# Altium footprint library PCB_BQ51013BYFPR.PcbLib: 17 footprints (part 1 of 2)
Each footprint in its own frame and in the unit in brackets; x right, y up, seen from the top. Pads: shape width x height; smd on the part's side, far side on the other; paste and mask are expansions set on the pad; w line width, h text height; cw(c..) or ccw(c..) is an arc to the next point about the centre after c.
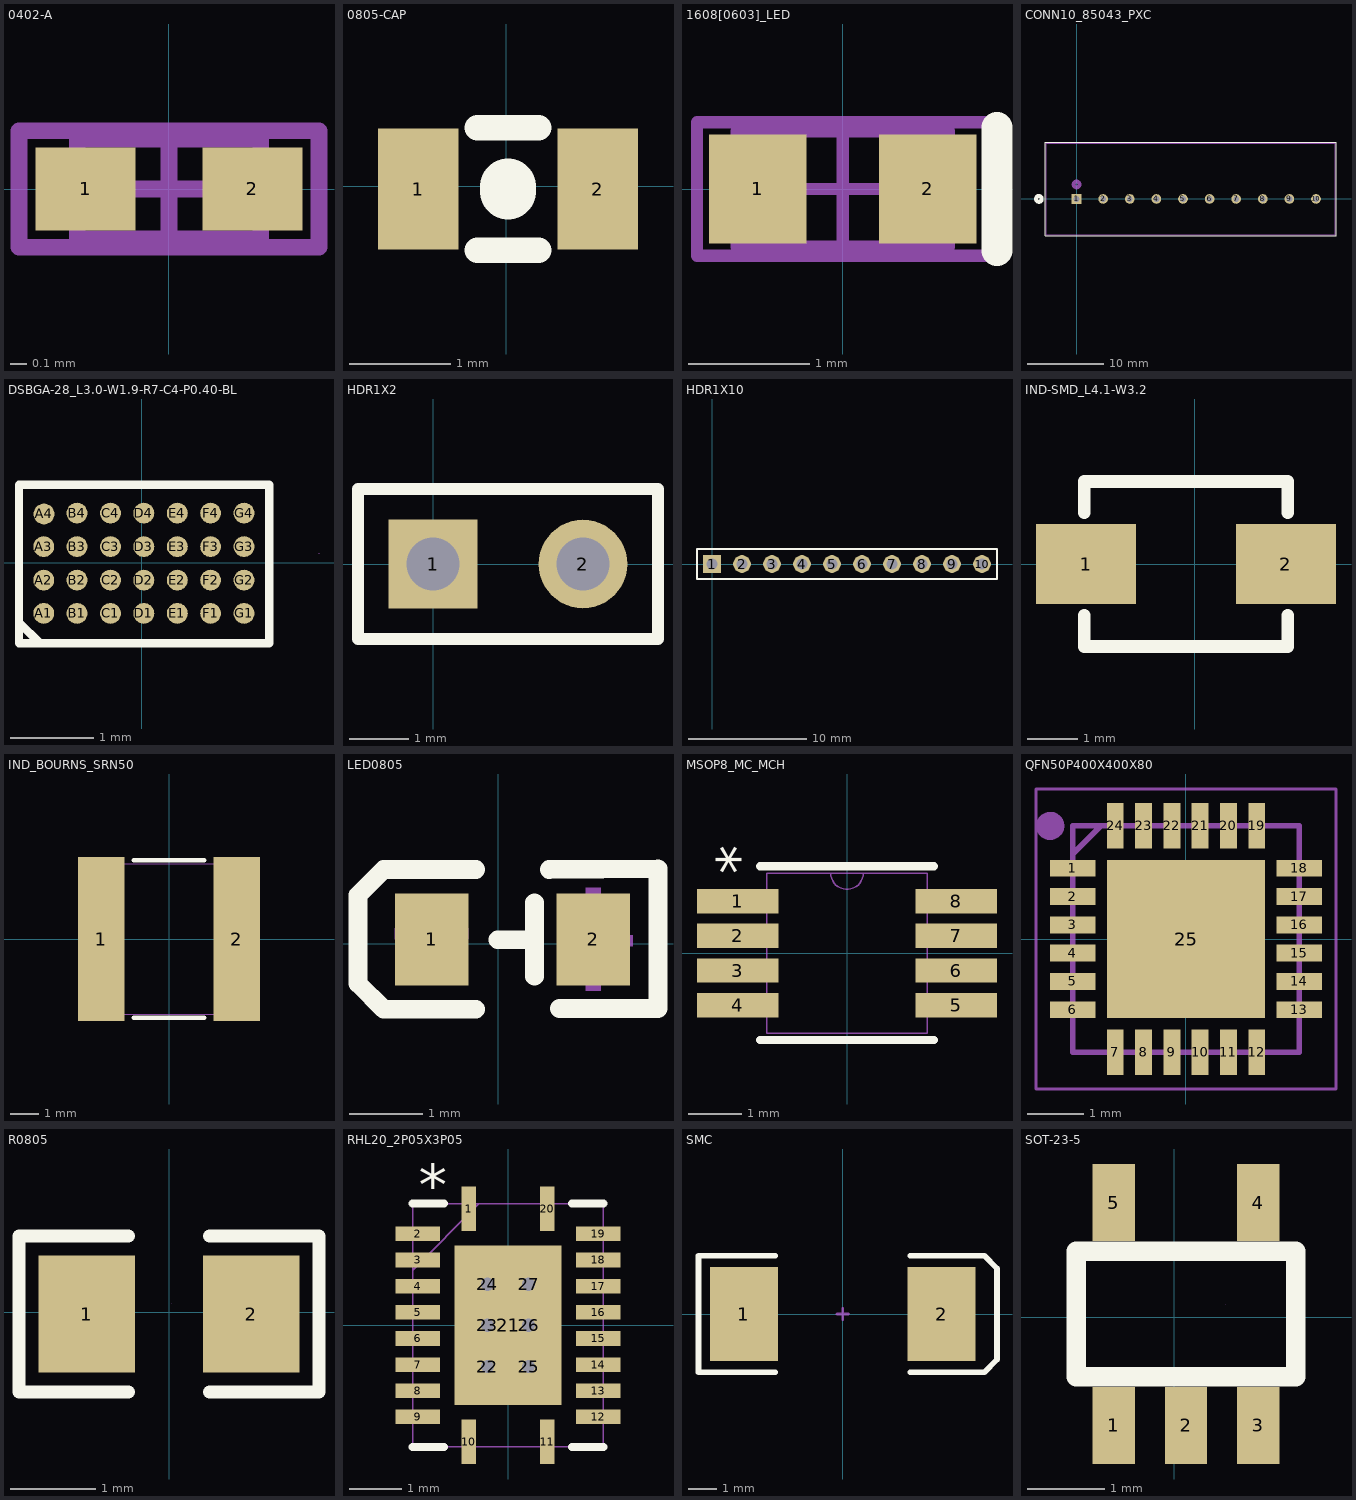
[diagram p0: the footprints below, top view; thin cyan lines are the x and y axes]

## 0402-A [mm] "Chip Inductor, Body 1.0x0.5mm, IPC High Density"
height 0.55
pads (2):
  rect 0.6x0.5 smd: 1(-0.5,0) 2(0.5,0)
Mechanical 13:
  lines w0.1: -0.55,-0.3 -0.55,0.3 0.55,0.3 0.55,-0.3 -0.55,-0.3
Mechanical 15:
  lines w0.1: -0.3,0 0.3,0 ; 0,-0.3 0,0.3 ; -0.9,-0.35 -0.9,0.35 0.9,0.35 0.9,-0.35 -0.9,-0.35
3D body: height 0.55, standoff 0, extent -0.55,-0.3 0.55,0.3

## 0805-CAP [mil]
height 104.33
pads (2):
  rect 31.5x47.2 smd: 1(-34.25,-1) 2(35.75,-1)
Top Overlay:
  lines w10: -11.25,-25 12.75,-25 ; -11.25,23 12.75,23
  lines w22: 0.75,-2 0.75,0
Mechanical 15:
  lines w0.1: 20.74,3.99 20.76,4.01

## 1608[0603]_LED [mm] "Chip Capacitor, Body 1.6x0.8mm, IPC High Density"
height 1.3
pads (2):
  rect 0.8x0.9 smd: 1(-0.7,0) 2(0.7,0)
Top Overlay:
  lines w0.254: 1.27,-0.508 1.27,0.508
Mechanical 13:
  lines w0.1: -0.875,-0.475 -0.875,0.475 0.875,0.475 0.875,-0.475 -0.875,-0.475
Mechanical 15:
  lines w0.1: -0.475,0 0.475,0 ; 0,-0.475 0,0.475 ; -1.2,-0.55 -1.2,0.55 1.2,0.55 1.2,-0.55 -1.2,-0.55
3D body: height 1.3, standoff 0, extent -0.875,-0.475 0.875,0.475

## CONN10_85043_PXC [mil]
pads (10):
  rect 50x50 hole 30 mask-1000: 1(0,0)
  round 50 hole 30 mask-1000: 2(137.8,0) 3(275.59,0) 4(413.39,0) 5(551.18,0) 6(688.98,0) 7(826.77,0) 8(964.57,0) 9(1102.36,0) 10(1240.16,0)
Top Overlay:
  circle w20: c-195,0 r15
  lines w6: -162.42,-189.6 1343.58,-189.6 1343.58,292.4 -162.42,292.4 -162.42,-189.6
Bottom Overlay:
  circle w20: c-195,0 r15
Top Solder:
  drawing of 10 lines, arcs and shapes, not listed
Bottom Solder:
  drawing of 10 lines, arcs and shapes, not listed
Mechanical 1:
  circle w20: c0,75 r15
  lines w1: -157.42,-184.6 1338.58,-184.6 1338.58,287.4 -157.42,287.4 -157.42,-184.6

## DSBGA-28_L3.0-W1.9-R7-C4-P0.40-BL [mm]
height 2.65
pads (28):
  round 0.25 smd: A1(-1.176,-0.607) A2(-1.176,-0.208) A3(-1.176,0.193) A4(-1.173,0.584) B1(-0.777,-0.607) B2(-0.777,-0.208) B3(-0.777,0.193) B4(-0.777,0.594) C1(-0.376,-0.607) C2(-0.376,-0.208) C3(-0.376,0.193) C4(-0.376,0.594) D1(0.023,-0.607) D2(0.023,-0.208) D3(0.023,0.193) D4(0.023,0.594) E1(0.424,-0.607) E2(0.424,-0.208) E3(0.424,0.193) E4(0.424,0.594) F1(0.823,-0.607) F2(0.823,-0.208) F3(0.823,0.193) F4(0.823,0.594) G1(1.224,-0.607) G2(1.224,-0.208) G3(1.224,0.193) G4(1.224,0.594)
Top Overlay:
  lines w0.1: -1.473,-0.965 -1.473,0.935 1.527,0.935 1.527,-0.965 -1.473,-0.965
  lines w0.102: -1.473,-0.715 -1.223,-0.965
Mechanical 15:
  lines w0.003: 2.122,0.111 2.122,0.112

## HDR1X2 [mm] "Connector; Header; 2 Position"
height 2.65
pads (2):
  rect 1.5x1.5 hole 0.9: 1(0,0)
  round 1.5 hole 0.9: 2(2.54,0)
Top Overlay:
  lines w0.2: -1.27,-1.27 -1.27,1.27 3.81,1.27 3.81,-1.27 -1.27,-1.27

## HDR1X10 [mm] "Connector; Header; 10 Position"
height 2.65
pads (10):
  rect 1.5x1.5 hole 0.9: 1(0,0)
  round 1.5 hole 0.9: 2(2.54,0) 3(5.08,0) 4(7.62,0) 5(10.16,0) 6(12.7,0) 7(15.24,0) 8(17.78,0) 9(20.32,0) 10(22.86,0)
Top Overlay:
  lines w0.2: -1.27,-1.27 24.13,-1.27 24.13,1.27 0.635,1.27 -1.27,1.27 -1.27,-1.27

## IND-SMD_L4.1-W3.2 [mm]
height 2.65
pads (2):
  rect 2x1.6 smd: 1(-2.175,0) 2(1.825,0)
Top Overlay:
  lines w0.254: -2.207,-1.031 -2.207,-1.651 1.857,-1.651 1.857,-1.031 ; -2.207,1.031 -2.207,1.651 1.857,1.651 1.857,1.031
Mechanical 15:
  lines w0.003: 0.904,0.127 0.905,0.127

## IND_BOURNS_SRN50 [mil]
pads (2):
  rect 63x224 smd: 1(-92.5,0) 2(92.5,0)
Top Overlay:
  lines w6: -47.9,-107.5 47.9,-107.5 ; -47.9,107.5 47.9,107.5
Mechanical 1:
  lines w1: -102.5,-102.5 102.5,-102.5 102.5,102.5 -102.5,102.5 -102.5,-102.5

## LED0805 [mm]
height 2.65
pads (2):
  rect 1x1.25 smd: 1(-0.905,0.061) 2(1.295,0.061)
Top Overlay:
  lines w0.254: -0.305,-0.889 -1.555,-0.889 ; -0.305,1.011 -1.555,1.011 ; -0.005,0.056 0.495,0.056 ; 0.495,-0.439 0.495,0.561 ; 0.695,1.011 2.175,1.021 2.175,-0.879 0.835,-0.879 ; -1.555,-0.889 -1.905,-0.539 -1.905,0.661 -1.555,1.011 ; -1.555,-0.889 -1.555,-0.889 ; -1.555,1.011 -1.555,1.011
Mechanical 15:
  region: -1.405,0.061 -0.405,0.061 -0.405,0.211 -1.405,0.211
  region: 0.83,-0.033 1.83,-0.033 1.83,0.117 0.83,0.117
  region: 1.195,0.761 1.395,0.761 1.395,-0.639 1.195,-0.639

## MSOP8_MC_MCH [mil]
pads (8):
  rect 60x18 smd: 1(-80.5,38.39) 2(-80.5,12.8) 3(-80.5,-12.8) 4(-80.5,-38.39) 5(80.5,-38.39) 6(80.5,-12.8) 7(80.5,12.8) 8(80.5,38.39)
Top Overlay:
  lines w6: -64,-64 64,-64 ; -64,64 64,64
  text "*" at -64.61,58 h31.25
Mechanical 1:
  lines w1: -12,59 ccw(c0,59) 12,59 ; -96.5,-46.39 -96.5,-30.39 -59,-30.39 -59,-46.39 -96.5,-46.39 ; -96.5,-20.8 -96.5,-4.8 -59,-4.8 -59,-20.8 -96.5,-20.8 ; -96.5,4.8 -96.5,20.8 -59,20.8 -59,4.8 -96.5,4.8 ; -96.5,30.39 -96.5,46.39 -59,46.39 -59,30.39 -96.5,30.39 ; -59,-59 59,-59 59,59 -59,59 -59,-59 ; 59,-46.39 59,-30.39 96.5,-30.39 96.5,-46.39 59,-46.39 ; 59,-20.8 59,-4.8 96.5,-4.8 96.5,-20.8 59,-20.8 ; 59,4.8 59,20.8 96.5,20.8 96.5,4.8 59,4.8 ; 59,30.39 59,46.39 96.5,46.39 96.5,30.39 59,30.39
  text "*" at -64.61,58 h31.25

## QFN50P400X400X80 [mil]
height 104.33
pads (25):
  rect 31.5x11.81 smd: 1(-78.42,49.52) 2(-78.42,29.84) 3(-78.42,10.15) 4(-78.42,-9.53) 5(-78.42,-29.21) 6(-78.42,-48.9) 13(79.06,-48.9) 14(79.06,-29.21) 15(79.06,-9.53) 16(79.06,10.15) 17(79.06,29.84) 18(79.06,49.52)
  rect 11.81x31.5 smd: 7(-48.9,-78.42) 8(-29.21,-78.42) 9(-9.53,-78.42) 10(10.15,-78.42) 11(29.84,-78.42) 12(49.52,-78.42) 19(49.52,79.06) 20(29.84,79.06) 21(10.15,79.06) 22(-9.53,79.06) 23(-29.21,79.06) 24(-48.9,79.06)
  rect 110.24x110.24 smd: 25(0.32,0.32)
Mechanical 15:
  lines w1.97: -104.02,-104.02 -104.02,104.64 104.64,104.64 104.64,-104.02 -104.02,-104.02
  lines w3.94: -78.42,59.38 -58.74,79.06 ; -78.42,-78.42 -78.42,79.06 79.06,79.06 79.06,-78.42 -78.42,-78.42
  lines w9.84: -89.26,78.84 cw(c-94.17,78.94) -89.26,79.05

## R0805 [mm]
height 2.65
pads (2):
  rect 1.133x1.377 smd: 1(-0.966,-0.023) 2(0.966,-0.023)
Top Overlay:
  lines w0.152: -0.476,-0.94 -1.761,-0.94 -1.761,0.894 -0.476,0.894 ; 0.476,-0.94 1.761,-0.94 1.761,0.894 0.476,0.894
Top Paste:
  region: -1.7,-0.663 -1.7,0.617 -1.65,0.667 -0.5,0.667 -0.45,0.617 -0.445,0.207 -0.895,0.207 -0.895,-0.243 -0.455,-0.243 -0.45,-0.663 -0.5,-0.713 -1.65,-0.713
  region: 0.45,-0.663 0.45,-0.243 0.895,-0.243 0.895,0.207 0.455,0.207 0.45,0.617 0.5,0.667 1.65,0.667 1.7,0.617 1.7,-0.663 1.65,-0.713 0.5,-0.713
Mechanical 15:
  lines w0.003: 0.029,0.104 0.03,0.105

## RHL20_2P05X3P05 [mm]
height 1.4
pads (27):
  rect 0.28x0.85 smd: 1(-0.75,2.225) 10(-0.75,-2.225) 11(0.75,-2.225) 20(0.75,2.225)
  rect 0.85x0.28 smd: 2(-1.725,1.75) 3(-1.725,1.25) 4(-1.725,0.75) 5(-1.725,0.25) 6(-1.725,-0.25) 7(-1.725,-0.75) 8(-1.725,-1.25) 9(-1.725,-1.75) 12(1.725,-1.75) 13(1.725,-1.25) 14(1.725,-0.75) 15(1.725,-0.25) 16(1.725,0.25) 17(1.725,0.75) 18(1.725,1.25) 19(1.725,1.75)
  rect 2.05x3.05 smd: 21(0,0)
  round 0.508 hole 0.254 mask-25.4: 22(-0.394,-0.787) 23(-0.394,0) 24(-0.394,0.787) 25(0.394,-0.787) 26(0.394,0) 27(0.394,0.787)
Top Overlay:
  lines w0.152: -1.825,-2.325 -1.223,-2.325 ; -1.825,2.325 -1.223,2.325 ; 1.223,-2.325 1.825,-2.325 ; 1.223,2.325 1.825,2.325
  text "*" at -1.707,2.29 h0.79
Top Solder:
  region: 0.394,1.046 0.295,1.027 0.211,0.971 0.154,0.887 0.135,0.787 0.154,0.688 0.211,0.604 0.295,0.548 0.394,0.528 0.493,0.548 0.577,0.604 0.633,0.688 0.653,0.787 0.633,0.887 0.577,0.971 0.493,1.027
  region: 0.394,0.259 0.295,0.239 0.211,0.183 0.154,0.099 0.135,0 0.154,-0.099 0.211,-0.183 0.295,-0.239 0.394,-0.259 0.493,-0.239 0.577,-0.183 0.633,-0.099 0.653,0 0.633,0.099 0.577,0.183 0.493,0.239
  region: 0.394,-0.528 0.295,-0.548 0.211,-0.604 0.154,-0.688 0.135,-0.787 0.154,-0.887 0.211,-0.971 0.295,-1.027 0.394,-1.046 0.493,-1.027 0.577,-0.971 0.633,-0.887 0.653,-0.787 0.633,-0.688 0.577,-0.604 0.493,-0.548
  region: -0.394,1.046 -0.493,1.027 -0.577,0.971 -0.633,0.887 -0.653,0.787 -0.633,0.688 -0.577,0.604 -0.493,0.548 -0.394,0.528 -0.295,0.548 -0.211,0.604 -0.154,0.688 -0.135,0.787 -0.154,0.887 -0.211,0.971 -0.295,1.027
  region: -0.394,0.259 -0.493,0.239 -0.577,0.183 -0.633,0.099 -0.653,0 -0.633,-0.099 -0.577,-0.183 -0.493,-0.239 -0.394,-0.259 -0.295,-0.239 -0.211,-0.183 -0.154,-0.099 -0.135,0 -0.154,0.099 -0.211,0.183 -0.295,0.239
  region: -0.394,-0.528 -0.493,-0.548 -0.577,-0.604 -0.633,-0.688 -0.653,-0.787 -0.633,-0.887 -0.577,-0.971 -0.493,-1.027 -0.394,-1.046 -0.295,-1.027 -0.211,-0.971 -0.154,-0.887 -0.135,-0.787 -0.154,-0.688 -0.211,-0.604 -0.295,-0.548
Bottom Solder:
  region: 0.394,1.046 0.295,1.027 0.211,0.971 0.154,0.887 0.135,0.787 0.154,0.688 0.211,0.604 0.295,0.548 0.394,0.528 0.493,0.548 0.577,0.604 0.633,0.688 0.653,0.787 0.633,0.887 0.577,0.971 0.493,1.027
  region: 0.394,0.259 0.295,0.239 0.211,0.183 0.154,0.099 0.135,0 0.154,-0.099 0.211,-0.183 0.295,-0.239 0.394,-0.259 0.493,-0.239 0.577,-0.183 0.633,-0.099 0.653,0 0.633,0.099 0.577,0.183 0.493,0.239
  region: 0.394,-0.528 0.295,-0.548 0.211,-0.604 0.154,-0.688 0.135,-0.787 0.154,-0.887 0.211,-0.971 0.295,-1.027 0.394,-1.046 0.493,-1.027 0.577,-0.971 0.633,-0.887 0.653,-0.787 0.633,-0.688 0.577,-0.604 0.493,-0.548
  region: -0.394,1.046 -0.493,1.027 -0.577,0.971 -0.633,0.887 -0.653,0.787 -0.633,0.688 -0.577,0.604 -0.493,0.548 -0.394,0.528 -0.295,0.548 -0.211,0.604 -0.154,0.688 -0.135,0.787 -0.154,0.887 -0.211,0.971 -0.295,1.027
  region: -0.394,0.259 -0.493,0.239 -0.577,0.183 -0.633,0.099 -0.653,0 -0.633,-0.099 -0.577,-0.183 -0.493,-0.239 -0.394,-0.259 -0.295,-0.239 -0.211,-0.183 -0.154,-0.099 -0.135,0 -0.154,0.099 -0.211,0.183 -0.295,0.239
  region: -0.394,-0.528 -0.493,-0.548 -0.577,-0.604 -0.633,-0.688 -0.653,-0.787 -0.633,-0.887 -0.577,-0.971 -0.493,-1.027 -0.394,-1.046 -0.295,-1.027 -0.211,-0.971 -0.154,-0.887 -0.135,-0.787 -0.154,-0.688 -0.211,-0.604 -0.295,-0.548
Mechanical 1:
  lines w0.025: -1.825,1.055 -0.555,2.325 ; -1.825,-2.325 -1.825,2.325 1.825,2.325 1.825,-2.325 -1.825,-2.325
  text "*" at -1.702,2.276 h0.79

## SMC [mm] "DO-214-AB/SMC; 2 C-Bend Leads; Body 7.9 x 5.9 mm, inc. leads (LxW)"
height 2.65
pads (2):
  rect 2.4x3.3 smd: 1(-3.475,0) 2(3.475,0)
Top Overlay:
  lines w0.2: -2.375,-2.05 -5.075,-2.05 -5.075,2.05 -2.375,2.05 ; 2.375,-2.05 4.975,-2.05 5.425,-1.6 5.425,1.6 4.975,2.055 ; 2.375,2.05 4.975,2.05
Mechanical 1:
  lines w0.1: -0.2,0 0.2,0 ; 0,-0.2 0,0.2

## SOT-23-5 [mm]
height 2.65
pads (5):
  rect 0.551x1 smd: 1(-0.787,-1.405) 2(0.152,-1.405) 3(1.092,-1.405) 4(1.092,1.491) 5(-0.787,1.491)
Top Overlay:
  lines w0.254: -1.168,-0.77 -1.27,-0.77 ; -1.168,0.856 -1.27,0.856 ; -0.381,-0.77 -0.279,-0.77 ; -0.381,0.856 0.686,0.856 ; 0.584,-0.77 0.686,-0.77 ; 1.473,-0.77 1.575,-0.77 ; 1.473,0.856 1.575,0.856 ; -1.27,-0.77 1.575,-0.77 ; -1.27,-0.77 -1.27,0.856 ; -1.27,0.856 0.991,0.856 1.575,0.856 ; 1.575,-0.77 1.575,0.856
Mechanical 15:
  lines w0.003: 0.66,0.17 0.661,0.17